# Altium footprint library TVS_2031-42T-SM-RPLF.PcbLib: 1 footprints
Each footprint in its own frame and in the unit in brackets; x right, y up, seen from the top. Pads: shape width x height; smd on the part's side, far side on the other; paste and mask are expansions set on the pad; w line width, h text height; cw(c..) or ccw(c..) is an arc to the next point about the centre after c.
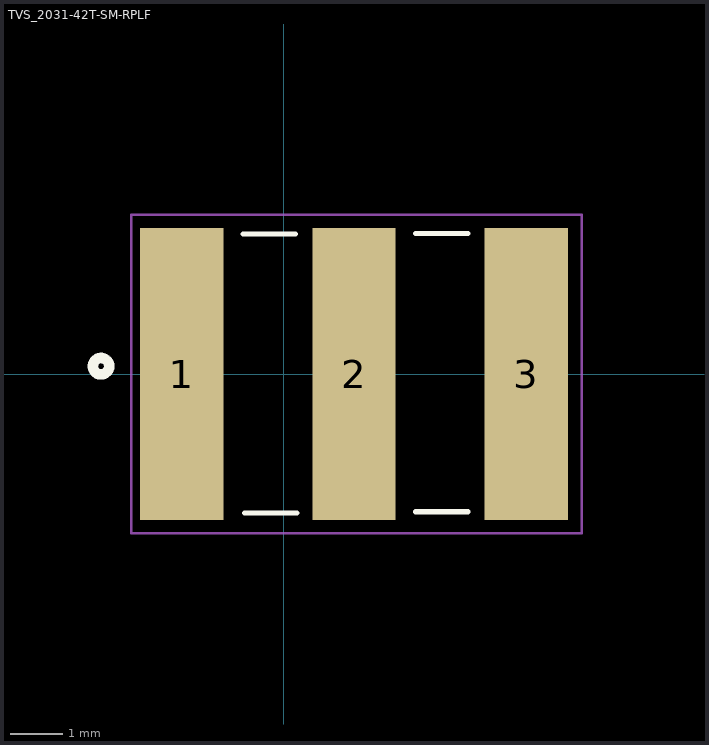
[diagram p0: the footprint, top view; thin cyan lines are the x and y axes]

## TVS_2031-42T-SM-RPLF [mm]
pads (3):
  rect 1.6x5.6 smd: 1(-1.95,0) 2(1.35,0) 3(4.65,0)
Top Overlay:
  circle w0.2: c-3.5,0.15 r0.158
  lines w0.1: -0.775,2.684 0.225,2.684 ; -0.746,-2.667 0.254,-2.667 ; 2.533,-2.643 3.533,-2.643 ; 2.533,2.691 3.533,2.691
Courtyard Top:
  lines w0.05: -2.921,-3.05 -2.921,3.05 5.715,3.05 5.715,-3.05 -2.921,-3.05
3D body "2038-xx-sm.stp": height 5, standoff 0, extent -2.286,-2.5 5.214,2.5